# Altium footprint library CKey_Pcb.PcbLib: 41 footprints (part 1 of 3)
Each footprint in its own frame and in the unit in brackets; x right, y up, seen from the top. Pads: shape width x height; smd on the part's side, far side on the other; paste and mask are expansions set on the pad; w line width, h text height; cw(c..) or ccw(c..) is an arc to the next point about the centre after c.
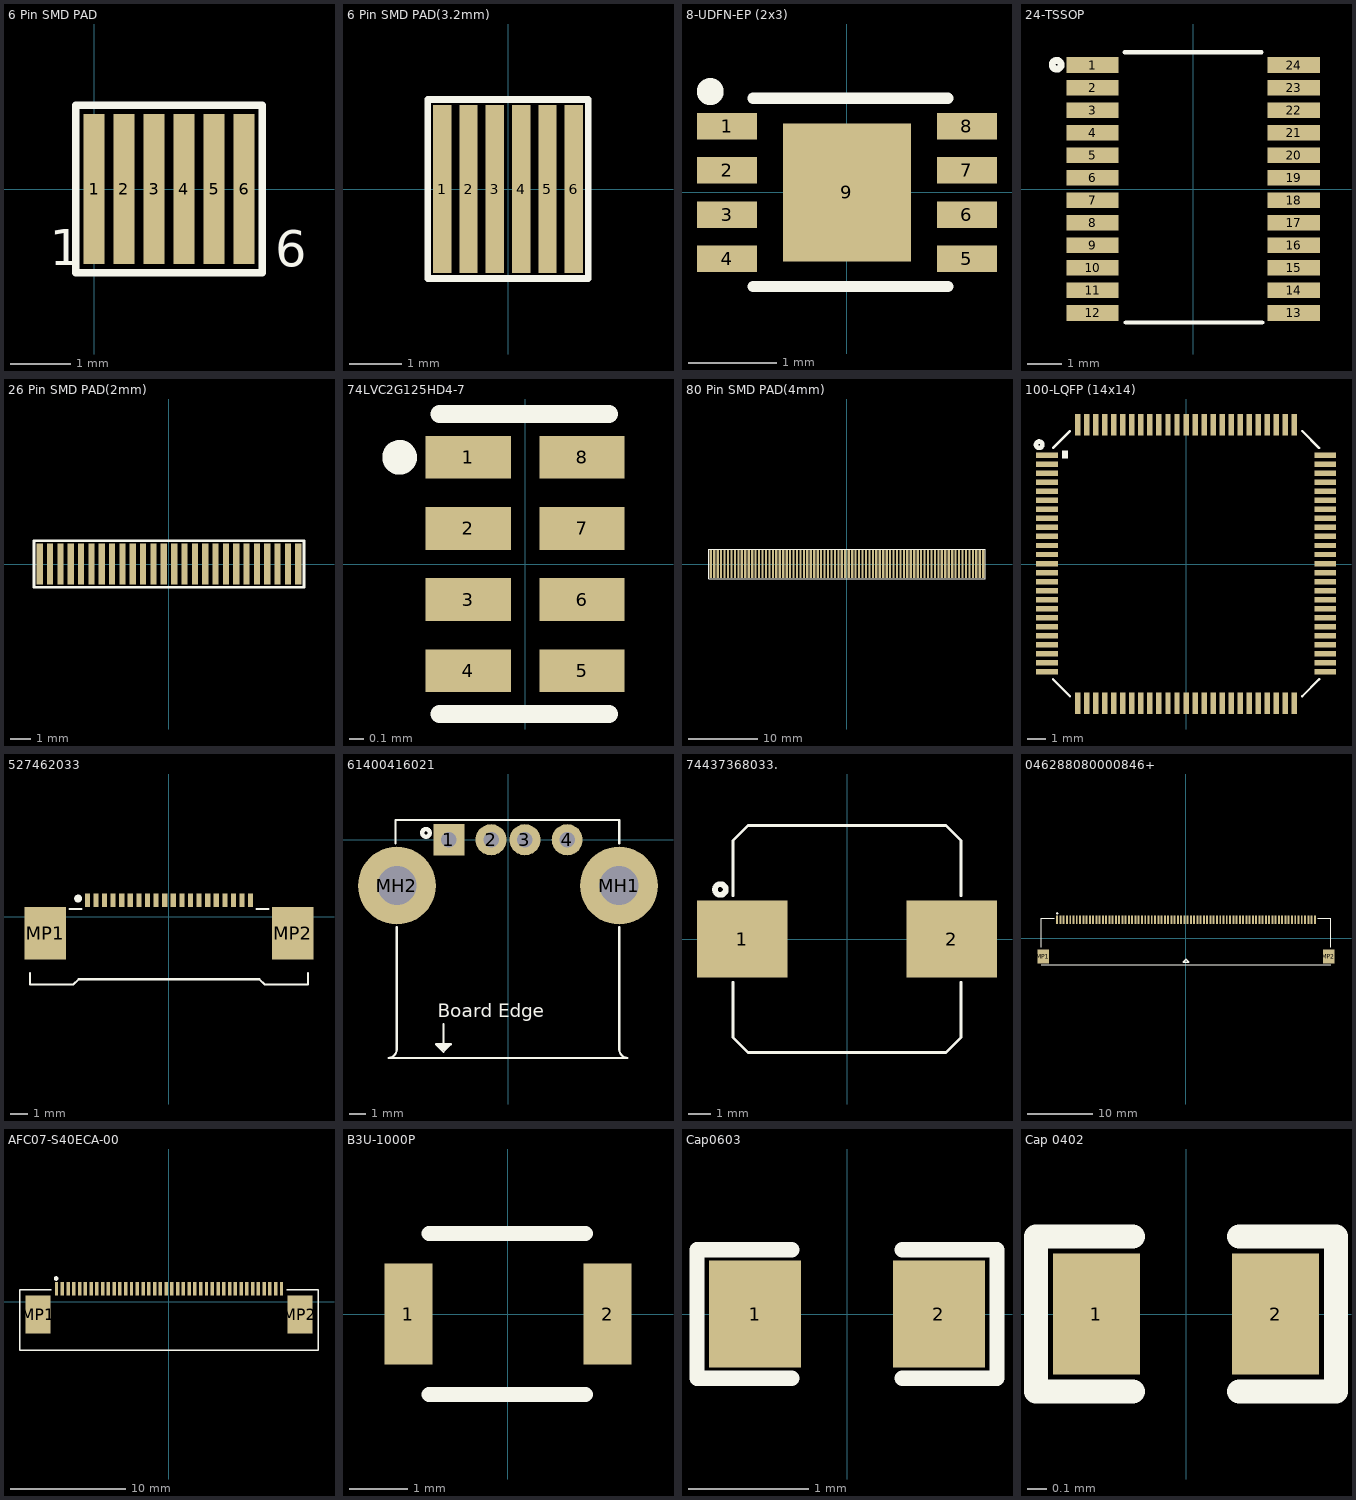
[diagram p0: the footprints below, top view; thin cyan lines are the x and y axes]

## 6 Pin SMD PAD [mm]
pads (6):
  rect 0.35x2.5 smd: 1(0,0) 2(0.5,0) 3(1,0) 4(1.5,0) 5(2,0) 6(2.5,0)
Top Overlay:
  lines w0.127: 2.794,-1.397 -0.305,-1.397 -0.305,1.397 2.794,1.397 ; 2.805,-1.397 2.805,1.397
  text "1" at -0.737,-1.27 h0.6
  text "6" at 3.023,-1.295 h0.6

## 6 Pin SMD PAD(3.2mm) [mm]
pads (6):
  rect 0.35x3.2 smd: 1(-1.25,0) 2(-0.75,0) 3(-0.25,0) 4(0.25,0) 5(0.75,0) 6(1.25,0)
Top Overlay:
  lines w0.127: -1.524,-1.702 -1.524,1.702 1.524,1.702 1.524,-1.702 -1.524,-1.702

## 8-UDFN-EP (2x3) [mm]
pads (9):
  rect 0.68x0.3 smd: 1(-1.36,0.75) 2(-1.36,0.25) 3(-1.36,-0.25) 4(-1.36,-0.75) 5(1.36,-0.75) 6(1.36,-0.25) 7(1.36,0.25) 8(1.36,0.75)
  rect 1.45x1.56 smd: 9(0,0)
Top Overlay:
  circle w0.254: c-1.549,1.143 r0.025
  lines w0.127: -1.067,-1.067 1.143,-1.067 ; -1.067,1.067 1.143,1.067
3D body "UDFN8_2X3_ONS.step": height 0.81, standoff 0, extent -1.549,-1.003 1.549,1.003

## 24-TSSOP [mm] "IC BUS SWITCH 1 X 8:1 24TSSOP"
pads (24):
  rect 1.5x0.45 smd: 1(-2.9,3.575) 2(-2.9,2.925) 3(-2.9,2.275) 4(-2.9,1.625) 5(-2.9,0.975) 6(-2.9,0.325) 7(-2.9,-0.325) 8(-2.9,-0.975) 9(-2.9,-1.625) 10(-2.9,-2.275) 11(-2.9,-2.925) 12(-2.9,-3.575) 13(2.9,-3.575) 14(2.9,-2.925) 15(2.9,-2.275) 16(2.9,-1.625) 17(2.9,-0.975) 18(2.9,-0.325) 19(2.9,0.325) 20(2.9,0.975) 21(2.9,1.625) 22(2.9,2.275) 23(2.9,2.925) 24(2.9,3.575)
Top Overlay:
  circle w0.2: c-3.937,3.581 r0.127
  lines w0.127: -1.968,3.943 1.969,3.943 ; -1.948,-3.85 1.989,-3.85
3D body "TCA9548APWR.STEP": height 1.2, standoff 0, extent -3.2,-3.9 3.2,3.9

## 26 Pin SMD PAD(2mm) [mm]
pads (26):
  rect 0.3x2 smd: 1(6.25,0) 2(5.75,0) 3(5.25,0) 4(4.75,0) 5(4.25,0) 6(3.75,0) 7(3.25,0) 8(2.75,0) 9(2.25,0) 10(1.75,0) 11(1.25,0) 12(0.75,0) 13(0.25,0) 14(-0.25,0) 15(-0.75,0) 16(-1.25,0) 17(-1.75,0) 18(-2.25,0) 19(-2.75,0) 20(-3.25,0) 21(-3.75,0) 22(-4.25,0) 23(-4.75,0) 24(-5.25,0) 25(-5.75,0) 26(-6.25,0)
Top Overlay:
  lines w0.127: -6.528,-1.118 6.528,-1.118 6.528,1.118 -6.528,1.118 -6.528,-1.118

## 74LVC2G125HD4-7 [mm]
pads (8):
  rect 0.6x0.3 smd: 1(-0.4,0.75) 2(-0.4,0.25) 3(-0.4,-0.25) 4(-0.4,-0.75) 5(0.4,-0.75) 6(0.4,-0.25) 7(0.4,0.25) 8(0.4,0.75)
Top Overlay:
  circle w0.127: c-0.883,0.75 r0.058
  lines w0.127: -0.603,-1.055 0.591,-1.055 ; -0.603,1.055 0.591,1.055
3D body "74LVC2G125GT,115.stp": height 0.6, standoff 0, extent -0.525,-1 0.525,1

## 80 Pin SMD PAD(4mm) [mm]
pads (80):
  rect 0.32x4 smd: 1(-19.75,0) 2(-19.25,0) 3(-18.75,0) 4(-18.25,0) 5(-17.75,0) 6(-17.25,0) 7(-16.75,0) 8(-16.25,0) 9(-15.75,0) 10(-15.25,0) 11(-14.75,0) 12(-14.25,0) 13(-13.75,0) 14(-13.25,0) 15(-12.75,0) 16(-12.25,0) 17(-11.75,0) 18(-11.25,0) 19(-10.75,0) 20(-10.25,0) 21(-9.75,0) 22(-9.25,0) 23(-8.75,0) 24(-8.25,0) 25(-7.75,0) 26(-7.25,0) 27(-6.75,0) 28(-6.25,0) 29(-5.75,0) 30(-5.25,0) 31(-4.75,0) 32(-4.25,0) 33(-3.75,0) 34(-3.25,0) 35(-2.75,0) 36(-2.25,0) 37(-1.75,0) 38(-1.25,0) 39(-0.75,0) 40(-0.25,0) 41(0.25,0) 42(0.75,0) 43(1.25,0) 44(1.75,0) 45(2.25,0) 46(2.75,0) 47(3.25,0) 48(3.75,0) 49(4.25,0) 50(4.75,0) 51(5.25,0) 52(5.75,0) 53(6.25,0) 54(6.75,0) 55(7.25,0) 56(7.75,0) 57(8.25,0) 58(8.75,0) 59(9.25,0) 60(9.75,0) 61(10.25,0) 62(10.75,0) 63(11.25,0) 64(11.75,0) 65(12.25,0) 66(12.75,0) 67(13.25,0) 68(13.75,0) 69(14.25,0) 70(14.75,0) 71(15.25,0) 72(15.75,0) 73(16.25,0) 74(16.75,0) 75(17.25,0) 76(17.75,0) 77(18.25,0) 78(18.75,0) 79(19.25,0) 80(19.75,0)
Top Overlay:
  lines w0.127: -20.015,-2.103 20.015,-2.103 20.015,2.103 -20.015,2.103 -20.015,-2.103

## 100-LQFP (14x14) [mm]
pads (100):
  rect 1.2x0.3 smd: 1(-7.7,6.025) 2(-7.7,5.525) 3(-7.7,5.025) 4(-7.7,4.525) 5(-7.7,4.025) 6(-7.7,3.525) 7(-7.7,3.025) 8(-7.7,2.525) 9(-7.7,2.025) 10(-7.7,1.525) 11(-7.7,1.025) 12(-7.7,0.525) 13(-7.7,0.025) 14(-7.7,-0.475) 15(-7.7,-0.975) 16(-7.7,-1.475) 17(-7.7,-1.975) 18(-7.7,-2.475) 19(-7.7,-2.975) 20(-7.7,-3.475) 21(-7.7,-3.975) 22(-7.7,-4.475) 23(-7.7,-4.975) 24(-7.7,-5.475) 25(-7.7,-5.975) 51(7.7,-5.975) 52(7.7,-5.475) 53(7.7,-4.975) 54(7.7,-4.475) 55(7.7,-3.975) 56(7.7,-3.475) 57(7.7,-2.975) 58(7.7,-2.475) 59(7.7,-1.975) 60(7.7,-1.475) 61(7.7,-0.975) 62(7.7,-0.475) 63(7.7,0.025) 64(7.7,0.525) 65(7.7,1.025) 66(7.7,1.525) 67(7.7,2.025) 68(7.7,2.525) 69(7.7,3.025) 70(7.7,3.525) 71(7.7,4.025) 72(7.7,4.525) 73(7.7,5.025) 74(7.7,5.525) 75(7.7,6.025)
  rect 0.3x1.2 smd: 26(-6,-7.7) 27(-5.5,-7.7) 28(-5,-7.7) 29(-4.5,-7.7) 30(-4,-7.7) 31(-3.5,-7.7) 32(-3,-7.7) 33(-2.5,-7.7) 34(-2,-7.7) 35(-1.5,-7.7) 36(-1,-7.7) 37(-0.5,-7.7) 38(0,-7.7) 39(0.5,-7.7) 40(1,-7.7) 41(1.5,-7.7) 42(2,-7.7) 43(2.5,-7.7) 44(3,-7.7) 45(3.5,-7.7) 46(4,-7.7) 47(4.5,-7.7) 48(5,-7.7) 49(5.5,-7.7) 50(6,-7.7) 76(6,7.7) 77(5.5,7.7) 78(5,7.7) 79(4.5,7.7) 80(4,7.7) 81(3.5,7.7) 82(3,7.7) 83(2.5,7.7) 84(2,7.7) 85(1.5,7.7) 86(1,7.7) 87(0.5,7.7) 88(0,7.7) 89(-0.5,7.7) 90(-1,7.7) 91(-1.5,7.7) 92(-2,7.7) 93(-2.5,7.7) 94(-3,7.7) 95(-3.5,7.7) 96(-4,7.7) 97(-4.5,7.7) 98(-5,7.7) 99(-5.5,7.7) 100(-6,7.7)
Top Overlay:
  circle w0.254: c-8.128,6.604 r0.178
  region: -6.528,6.274 -6.858,6.274 -6.858,5.842 -6.528,5.842
  lines w0.127: -7.366,-6.375 -6.426,-7.315 ; -7.366,6.426 -6.426,7.366 ; 6.426,-7.315 7.366,-6.375 ; 6.426,7.366 7.366,6.426
3D body "User Library-LQFP100_05.step": height 1.6, standoff 0, extent -8,-7.974 8,8.026

## 527462033 [mm]
pads (22):
  rect 0.3x0.8 smd: 1(-4.75,0.962) 2(-4.25,0.962) 3(-3.75,0.962) 4(-3.25,0.962) 5(-2.75,0.962) 6(-2.25,0.962) 7(-1.75,0.962) 8(-1.25,0.962) 9(-0.75,0.962) 10(-0.25,0.962) 11(0.25,0.962) 12(0.75,0.962) 13(1.25,0.962) 14(1.75,0.962) 15(2.25,0.962) 16(2.75,0.962) 17(3.25,0.962) 18(3.75,0.962) 19(4.25,0.962) 20(4.75,0.962)
  rect 2.4x3.05 smd: MP1(-7.2,-0.962) MP2(7.2,-0.962)
Top Overlay:
  circle w0.254: c-5.283,1.067 r0.102
  lines w0.127: -8.077,-3.277 -8.077,-3.937 -5.563,-3.937 -5.258,-3.632 5.258,-3.632 5.563,-3.937 8.077,-3.937 8.077,-3.277 ; -5.791,0.457 -5.105,0.457 ; 5.105,0.457 5.791,0.457
3D body "527462033.stp": height 2, standoff -0.02, extent -8.05,-3.894 8.05,1.106

## 61400416021 [mm]
pads (6):
  rect 1.84x1.84 hole 0.92: 1(-3.5,0)
  round 1.84 hole 0.92: 2(-1,0) 3(1,0) 4(3.5,0)
  round 4.6 hole 2.3: MH1(6.57,-2.71) MH2(-6.57,-2.71)
Top Overlay:
  circle w0.254: c-4.851,0.406 r0.227
  rectangle: -3.962,-12.433 -3.658,-12.268
  rectangle: -4.115,-12.313 -3.531,-12.09
  lines w0.127: -6.655,-0.229 -6.655,1.168 6.528,1.168 ; -6.579,-5.156 -6.579,-12.344 cw(c-7.099,-12.383) -7.061,-12.903 7.061,-12.903 cw(c7.099,-12.383) 6.579,-12.344 6.579,-5.156 ; -3.81,-10.897 -3.81,-12.09 -4.267,-12.09 -3.823,-12.535 -3.378,-12.09 -3.785,-12.09 ; 6.579,-0.229 6.579,1.168
  text "Board Edge" at -4.14,-10.503 h0.8
3D body "61400416021_Download_STP_61400416021_rev1.stp": height 7.93, standoff -3.76, extent -8.048,-12.919 7.947,1.081

## 74437368033. [mm]
pads (2):
  rect 4.1x3.5 smd: 1(-4.75,0) 2(4.75,0)
Top Overlay:
  circle w0.254: c-5.742,2.244 r0.246
  lines w0.127: -5.17,-1.958 -5.17,-4.466 -4.488,-5.148 4.488,-5.148 5.17,-4.466 5.17,-1.958 ; -5.17,1.958 -5.17,4.466 -4.488,5.148 4.488,5.148 5.17,4.466 5.17,1.958
3D body "74437368010_Download_STP_WE-LHMI-1040_rev1.stp": height 3.7, standoff -0.1, extent -5.5,-5 5.5,5

## 046288080000846+ [mm]
pads (82):
  rect 0.3x1.3 smd: 1(-19.75,2.825) 2(-19.25,2.825) 3(-18.75,2.825) 4(-18.25,2.825) 5(-17.75,2.825) 6(-17.25,2.825) 7(-16.75,2.825) 8(-16.25,2.825) 9(-15.75,2.825) 10(-15.25,2.825) 11(-14.75,2.825) 12(-14.25,2.825) 13(-13.75,2.825) 14(-13.25,2.825) 15(-12.75,2.825) 16(-12.25,2.825) 17(-11.75,2.825) 18(-11.25,2.825) 19(-10.75,2.825) 20(-10.25,2.825) 21(-9.75,2.825) 22(-9.25,2.825) 23(-8.75,2.825) 24(-8.25,2.825) 25(-7.75,2.825) 26(-7.25,2.825) 27(-6.75,2.825) 28(-6.25,2.825) 29(-5.75,2.825) 30(-5.25,2.825) 31(-4.75,2.825) 32(-4.25,2.825) 33(-3.75,2.825) 34(-3.25,2.825) 35(-2.75,2.825) 36(-2.25,2.825) 37(-1.75,2.825) 38(-1.25,2.825) 39(-0.75,2.825) 40(-0.25,2.825) 41(0.25,2.825) 42(0.75,2.825) 43(1.25,2.825) 44(1.75,2.825) 45(2.25,2.825) 46(2.75,2.825) 47(3.25,2.825) 48(3.75,2.825) 49(4.25,2.825) 50(4.75,2.825) 51(5.25,2.825) 52(5.75,2.825) 53(6.25,2.825) 54(6.75,2.825) 55(7.25,2.825) 56(7.75,2.825) 57(8.25,2.825) 58(8.75,2.825) 59(9.25,2.825) 60(9.75,2.825) 61(10.25,2.825) 62(10.75,2.825) 63(11.25,2.825) 64(11.75,2.825) 65(12.25,2.825) 66(12.75,2.825) 67(13.25,2.825) 68(13.75,2.825) 69(14.25,2.825) 70(14.75,2.825) 71(15.25,2.825) 72(15.75,2.825) 73(16.25,2.825) 74(16.75,2.825) 75(17.25,2.825) 76(17.75,2.825) 77(18.25,2.825) 78(18.75,2.825) 79(19.25,2.825) 80(19.75,2.825)
  rect 1.8x2.2 smd: MP1(-21.9,-2.825) MP2(21.9,-2.825)
Top Overlay:
  circle w0.254: c-19.761,3.785 r0.051
  lines w0.127: -22.225,-4.115 22.225,-4.115 ; -22.225,-1.403 -22.225,3.048 -20.193,3.048 ; 20.193,3.048 22.225,3.048 22.225,-1.403
  lines w0.254: -0.432,-3.683 0,-3.251 0.432,-3.683 -0.432,-3.683
3D body "046288080000846+.STEP": height 2.1, standoff 0, extent -22.1,-3.434 22.1,2.966

## AFC07-S40ECA-00 [mm]
pads (42):
  rect 0.3x1.2 smd: 1(-9.75,1.125) 2(-9.25,1.125) 3(-8.75,1.125) 4(-8.25,1.125) 5(-7.75,1.125) 6(-7.25,1.125) 7(-6.75,1.125) 8(-6.25,1.125) 9(-5.75,1.125) 10(-5.25,1.125) 11(-4.75,1.125) 12(-4.25,1.125) 13(-3.75,1.125) 14(-3.25,1.125) 15(-2.75,1.125) 16(-2.25,1.125) 17(-1.75,1.125) 18(-1.25,1.125) 19(-0.75,1.125) 20(-0.25,1.125) 21(0.25,1.125) 22(0.75,1.125) 23(1.25,1.125) 24(1.75,1.125) 25(2.25,1.125) 26(2.75,1.125) 27(3.25,1.125) 28(3.75,1.125) 29(4.25,1.125) 30(4.75,1.125) 31(5.25,1.125) 32(5.75,1.125) 33(6.25,1.125) 34(6.75,1.125) 35(7.25,1.125) 36(7.75,1.125) 37(8.25,1.125) 38(8.75,1.125) 39(9.25,1.125) 40(9.75,1.125)
  rect 2.2x3.3 smd: MP1(-11.35,-1.125) MP2(11.35,-1.125)
Top Overlay:
  circle w0.254: c-9.775,2.014 r0.072
  lines w0.127: -10.211,1.016 -12.954,1.016 -12.954,-4.216 12.954,-4.216 12.954,1.016 10.211,1.016

## B3U-1000P [mm] "SWITCH TACTILE SPST-NO 0.05A 12V"
pads (2):
  rect 0.82x1.72 smd: 1(-1.7,0) 2(1.7,0)
Top Overlay:
  lines w0.254: -1.346,-1.372 0,-1.372 1.321,-1.372 ; -1.346,1.372 0,1.372 1.321,1.372
3D body "User Library-OMRON B3U1000P.step": height 1.6, standoff 0, extent -2,-1.263 2,1.237

## Cap0603 [mil]
pads (2):
  rect 30x35 smd mask+2.36: 1(-30,0) 2(30,0)
Top Overlay:
  lines w5: -18,-21 -49,-21 -49,21 -18,21 ; 18,-21 49,-21 49,21 18,21
3D body "User Library-CAPC1608X09.step": height 34.25, standoff -1.18, extent -31.51,-15.75 31.49,15.74

## Cap 0402 [mil]
pads (2):
  rect 18x25 smd mask+2.36: 1(-18.5,0) 2(18.5,0)
Top Overlay:
  lines w5: -11,-16 -31,-16 -31,16 -11,16 ; 11,-16 31,-16 31,16 11,16
3D body "User Library-Capacitor 0402.step": height 18.5, standoff -1.18, extent -19.68,-9.84 19.7,9.85